# Altium footprint library Main_Power_Uint_Pcb_Library.PcbLib: 28 footprints (part 1 of 2)
Each footprint in its own frame and in the unit in brackets; x right, y up, seen from the top. Pads: shape width x height; smd on the part's side, far side on the other; paste and mask are expansions set on the pad; w line width, h text height; cw(c..) or ccw(c..) is an arc to the next point about the centre after c.
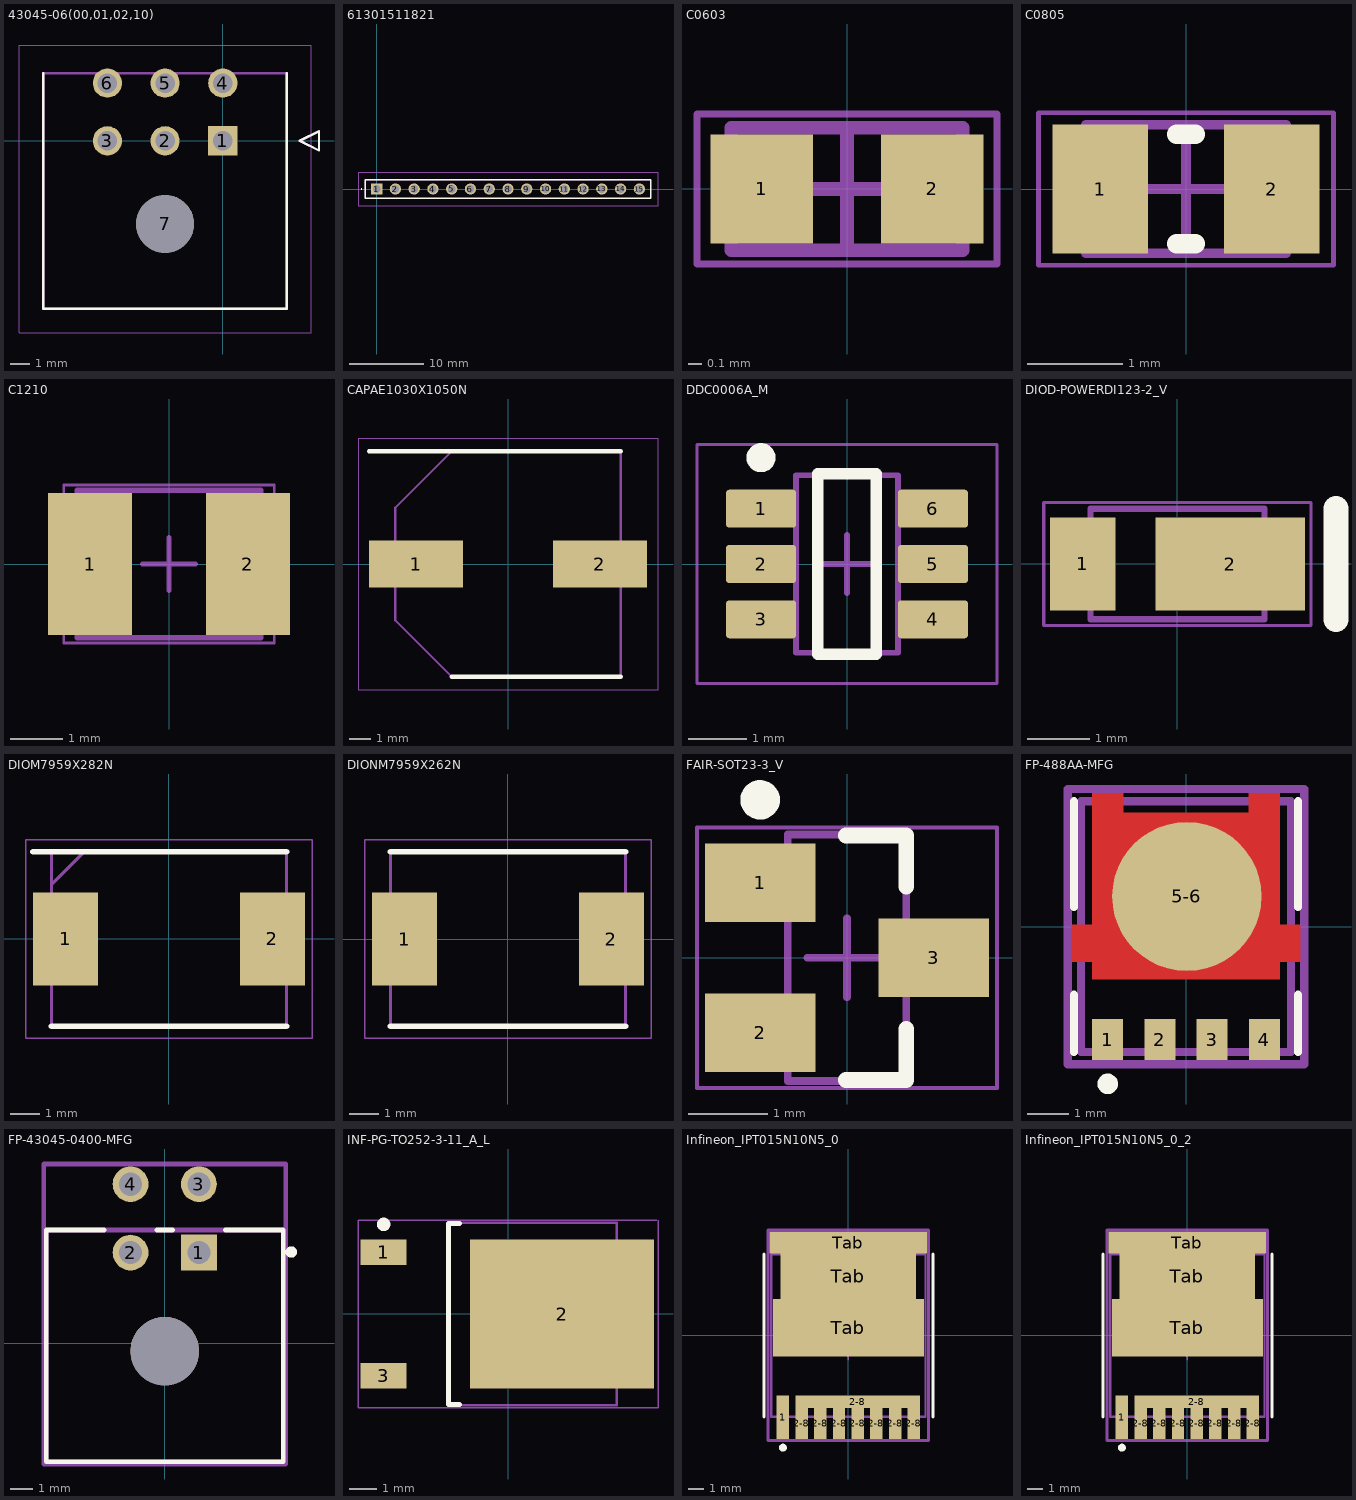
[diagram p0: the footprints below, top view; thin cyan lines are the x and y axes]

## 43045-06(00,01,02,10) [mm]
pads (7):
  rect 1.52x1.52 hole 1.02: 1(0,0)
  round 1.52 hole 1.02: 2(-3,0) 3(-6,0) 4(0,3) 5(-3,3) 6(-6,3)
  round 3 hole 3 unplated: 7(-3,-4.32)
Top Overlay:
  lines w0.127: -9.325,3.52 -9.325,-8.72 3.325,-8.72 3.325,3.52 ; 4,0 5,-0.5 5,0.5 4,0
Top 3D Body:
  lines w0.127: -9.325,-8.72 3.325,-8.72 3.325,3.52 -9.325,3.52 -9.325,-8.72 ; 4,0 5,-0.5 5,0.5 4,0
Top Courtyard:
  lines w0.05: -10.595,-9.99 4.595,-9.99 4.595,4.979 -10.595,4.979 -10.595,-9.99
3D body "43045-0600.stp": height 8.69, standoff -3.26, extent -9.585,-8.895 3.565,3.345

## 61301511821 [mm]
height 0.55
pads (15):
  rect 1.53x1.53 hole 1.02: 1(0,0)
  round 1.53 hole 1.02: 2(2.54,0) 3(5.08,0) 4(7.62,0) 5(10.16,0) 6(12.7,0) 7(15.24,0) 8(17.78,0) 9(20.32,0) 10(22.86,0) 11(25.4,0) 12(27.94,0) 13(30.48,0) 14(33.02,0) 15(35.56,0)
Top Overlay:
  lines w0.1: -2.1,0 cw(c-2.05,0) -2,0 cw(c-2.05,0) -2.1,0
  lines w0.2: -1.52,-1.25 -1.52,1.25 37.08,1.25 37.08,-1.25 -1.52,-1.25
Top 3D Body:
  lines w0.1: -1.52,-1.25 -1.52,1.25 37.08,1.25 37.08,-1.25 -1.52,-1.25
Top Courtyard:
  lines w0.1: -2.52,-2.25 -2.52,2.25 38.08,2.25 38.08,-2.25 -2.52,-2.25
3D body "61301511821.stp": height 8.75, standoff -5, extent -1.52,-1.25 37.08,1.25

## C0603 [mm]
height 0.55
pads (2):
  rect 0.75x0.8 smd: 1(-0.625,0) 2(0.625,0)
Top 3D Body:
  lines w0.1: -0.85,-0.45 -0.85,0.45 0.85,0.45 0.85,-0.45 -0.85,-0.45
Top Courtyard:
  lines w0.05: -1.1,-0.55 -1.1,0.55 1.1,0.55 1.1,-0.55 -1.1,-0.55
  lines w0.1: -0.45,0 0.45,0 ; 0,-0.45 0,0.45
3D body "Ceramic_Capacitor_0603_h32mil.step": height 0.81, standoff 0.01, extent -0.8,-0.4 0.8,0.4

## C0805 [mm]
height 0.65
pads (2):
  rect 1x1.35 smd: 1(-0.9,0) 2(0.9,0)
Top Overlay:
  lines w0.2: -0.1,-0.575 0.1,-0.575 ; -0.1,0.575 0.1,0.575
Top 3D Body:
  lines w0.1: -1.05,-0.675 1.05,-0.675 1.05,0.675 -1.05,0.675 -1.05,-0.675
Top Courtyard:
  lines w0.05: -1.55,-0.8 1.55,-0.8 1.55,0.8 -1.55,0.8 -1.55,-0.8
  lines w0.1: -0.5,0 0.5,0 ; 0,-0.5 0,0.5
3D body "Ceramic_Capacitor_0805_h32mil.step": height 0.81, standoff 0.01, extent -1,-0.625 1,0.625

## C1210 [mm]
height 2.8
pads (2):
  rect 1.6x2.7 smd: 1(-1.5,0) 2(1.5,0)
Top 3D Body:
  lines w0.1: -1.75,-1.4 -1.75,1.4 1.75,1.4 1.75,-1.4 -1.75,-1.4
Top Courtyard:
  lines w0.05: -2,-1.5 -2,1.5 2,1.5 2,-1.5 -2,-1.5
  lines w0.1: -0.5,0 0.5,0 ; 0,-0.5 0,0.5
3D body "Ceramic_Capacitor_1210_h38mil.step": height 0.96, standoff 0.01, extent -1.6,-1.25 1.6,1.25

## CAPAE1030X1050N [mm]
pads (2):
  rect 4.3x2.15 smd: 1(-4.2,0) 2(4.2,0)
Top Overlay:
  lines w0.2: -6.35,5.15 5.15,5.15 ; -2.575,-5.15 5.15,-5.15
Top 3D Body:
  lines w0.1: -5.15,-2.575 -2.575,-5.15 5.15,-5.15 5.15,5.15 -2.575,5.15 -5.15,2.575 -5.15,-2.575
Top Courtyard:
  lines w0.05: -6.85,-5.75 -6.85,5.75 6.85,5.75 6.85,-5.75 -6.85,-5.75
3D body "UCZ2A330MCL1GS.stp": height 10.5, standoff 0, extent -5.65,-5.25 5.65,5.25

## DDC0006A_M [mm] "SOT23, 6-Leads, Body 3.05x1.75mm, Pitch 0.95mm, IPC Low Density"
height 1.1
pads (6):
  rrect15% 1.2x0.65 smd: 1(-1.475,0.95) 2(-1.475,0) 3(-1.475,-0.95) 4(1.475,-0.95) 5(1.475,0) 6(1.475,0.95)
Top Overlay:
  circle w0.25: c-1.475,1.825 r0.125
  lines w0.2: -0.5,-1.55 -0.5,1.55 0.5,1.55 0.5,-1.55 -0.5,-1.55
Mechanical 1:
  text ".Designator" at -0.889,-0.127 h0.4
Top 3D Body:
  lines w0.1: -0.875,-1.525 0.875,-1.525 0.875,1.525 -0.875,1.525 -0.875,-1.525
Top Courtyard:
  lines w0.05: -2.575,-2.05 2.575,-2.05 2.575,2.05 -2.575,2.05 -2.575,-2.05
  lines w0.1: -0.5,0 0.5,0 ; 0,-0.5 0,0.5
3D body "DDC0006A.stp": height 0.9, standoff -0.02, extent -1.434,-1.485 1.434,1.485

## DIOD-POWERDI123-2_V [mm] "SOD, 2-Leads, Body 2.8x1.78mm"
height 1
pads (2):
  rect 1.05x1.5 smd: 1(-1.525,0)
  rect 2.4x1.5 smd: 2(0.85,0)
Top Overlay:
  lines w0.4: 2.55,-0.89 2.55,0.89
Top 3D Body:
  lines w0.1: -1.4,-0.89 1.4,-0.89 1.4,0.89 -1.4,0.89 -1.4,-0.89
Top Courtyard:
  lines w0.05: -2.15,-0.99 2.15,-0.99 2.15,0.99 -2.15,0.99 -2.15,-0.99
  lines w0.1: -0.25,0 0.25,0 ; 0,-0.25 0,0.25
3D body: height 1, standoff 0, extent -1.4,-0.89 1.4,0.89
3D body: height 1.01, standoff 1, extent 1.016,-0.89 1.27,0.89

## DIOM7959X282N [mm]
height 0.65
pads (2):
  rect 2.2x3.15 smd: 1(-3.5,0) 2(3.5,0)
Top Overlay:
  lines w0.2: -4.6,2.952 3.97,2.952 ; -3.97,-2.952 3.97,-2.952
Top 3D Body:
  lines w0.1: -3.97,1.852 -2.87,2.952 ; -3.97,-2.952 -3.97,2.952 3.97,2.952 3.97,-2.952 -3.97,-2.952
Top Courtyard:
  lines w0.05: -4.85,-3.36 -4.85,3.36 4.85,3.36 4.85,-3.36 -4.85,-3.36
3D body "SMLJ58AQ-TP.stp": height 2.5, standoff 0, extent -3.998,-3.05 4.002,3.05

## DIONM7959X262N [mm]
pads (2):
  rect 2.2x3.15 smd: 1(-3.5,0) 2(3.5,0)
Top Overlay:
  lines w0.2: -3.97,-2.952 3.97,-2.952 ; -3.97,2.952 3.97,2.952
Top 3D Body:
  lines w0.1: -3.97,-2.952 -3.97,2.952 3.97,2.952 3.97,-2.952 -3.97,-2.952
Top Courtyard:
  lines w0.05: -4.85,-3.36 -4.85,3.36 4.85,3.36 4.85,-3.36 -4.85,-3.36
3D body "SMDJ58A.stp": height 2.62, standoff 0, extent -3.97,-2.953 3.97,2.953

## FAIR-SOT23-3_V [mm] "SOT23, 3-Leads, Body 3.12x1.5mm, Pitch 0.95mm"
height 1.2
pads (3):
  rect 1.4x1 smd: 1(-1.1,0.95) 2(-1.1,-0.95) 3(1.1,0)
Top Overlay:
  circle w0.25: c-1.1,2 r0.125
  lines w0.2: -0.013,-1.55 0.75,-1.55 0.75,-0.9 ; -0.013,1.55 0.75,1.55 0.75,0.9
Top 3D Body:
  lines w0.1: -0.75,-1.56 -0.75,1.56 0.75,1.56 0.75,-1.56 -0.75,-1.56
Top Courtyard:
  lines w0.05: -1.9,-1.65 -1.9,1.65 1.9,1.65 1.9,-1.65 -1.9,-1.65
  lines w0.1: -0.5,0 0.5,0 ; 0,-0.5 0,0.5
3D body "SOT95P240X120-3L.step": height 1.2, standoff 0, extent -1.35,-1.56 1.35,1.56

## FP-488AA-MFG [mm]
height 0.65
pads (5):
  rect 0.75x1 smd paste+0 mask+0: 1(-1.905,-2.748) 2(-0.635,-2.748) 3(0.635,-2.748) 4(1.905,-2.748)
  round 3.631 smd paste+0 mask+0: 5-6(0.021,0.735)
Top Layer:
  region: -2.28,-1.282 -2.28,-0.857 -2.775,-0.857 -2.775,0.048 -2.28,0.047 -2.28,3.247 -1.53,3.247 -1.53,2.772 1.53,2.773 1.53,3.248 2.28,3.247 2.28,0.048 2.775,0.048 2.775,-0.857 2.28,-0.857 2.28,-1.283
Top Overlay:
  circle w0.25: c-1.905,-3.822 r0.125
  lines w0.2: -2.725,-3.05 -2.725,-1.657 ; -2.725,0.475 -2.725,3.05 ; 2.725,-3.05 2.725,-1.657 ; 2.725,0.475 2.725,3.05
Top Assembly:
  lines w0.2: -2.875,-3.347 2.875,-3.348 2.875,3.347 -2.875,3.347 -2.875,-3.347
Top 3D Body:
  lines w0.2: -2.55,-3.05 2.55,-3.05 2.55,3.05 -2.55,3.05 -2.55,-3.05
Top Courtyard:
  lines w0.2: -2.875,-3.347 2.875,-3.347 2.875,3.347 -2.875,3.347 -2.875,-3.347
Top Component Center:
  lines w0.1: -0.5,0 0.5,0 ; 0,-0.5 0,0.5
3D body "Trans_onsemi_NVMFS5A160PLZT1G_eec.STEP": height 0.25, standoff 0, extent -2.875,-3.347 2.875,3.347

## FP-43045-0400-MFG [mm]
height 7.5
pads (5):
  rect 1.57x1.57 hole 1.02 paste-2539.97 mask+0: 1(1.5,3.965)
  round 1.57 hole 1.02 paste-2539.97 mask+0: 2(-1.5,3.965) 3(1.5,6.965) 4(-1.5,6.965)
  round 3 hole 3 unplated paste-2539.97 mask+0: ""(0,-0.355)
Top Overlay:
  circle w0.25: c5.55,3.99 r0.125
  lines w0.2: -2.66,4.955 -5.2,4.955 -5.2,-5.205 5.2,-5.205 5.2,4.955 2.66,4.955 ; -0.34,4.955 0.34,4.955
Top Assembly:
  lines w0.2: -5.3,-5.305 5.3,-5.305 5.3,7.85 -5.3,7.85 -5.3,-5.305
Top 3D Body:
  lines w0.2: -5.2,-5.205 5.2,-5.205 5.2,4.955 -5.2,4.955 -5.2,-5.205
Top Courtyard:
  lines w0.2: -5.3,-5.305 5.3,-5.305 5.3,7.85 -5.3,7.85 -5.3,-5.305
Top Component Center:
  lines w0.1: -0.5,0 0.5,0 ; 0,-0.5 0,0.5
3D body "Conn_Molex_43045-0400_eec.STEP": height 0.25, standoff 0, extent -5.3,-5.305 5.3,7.85

## INF-PG-TO252-3-11_A_L [mm] "DPAK, 3-Leads, Body 6.57x6.1mm, Pitch 2.29mm, IPC High Density"
height 2.41
pads (3):
  rect 1.7x0.95 smd: 1(-4.6,2.29) 3(-4.6,-2.29)
  rect 6.8x5.5 smd: 2(2,0)
Top Overlay:
  circle w0.25: c-4.6,3.315 r0.125
  lines w0.2: -1.8,-3.35 -2.2,-3.35 -2.2,3.35 -1.8,3.35
Top 3D Body:
  lines w0.1: -2.2,-3.375 4.02,-3.375 4.02,3.375 -2.2,3.375 -2.2,-3.375
Top Courtyard:
  lines w0.05: -5.55,3.475 -5.55,-3.475 5.55,-3.475 5.55,3.475
  lines w0.055: -5.55,3.475 5.5,3.475
  lines w0.1: -0.5,0 0.5,0 ; 0,-0.5 0,0.5
3D body: height 2.41, standoff 0, extent -2.2,-3.375 4.02,3.375

## Infineon_IPT015N10N5_0 [mm]
height 7.5
pads (12):
  rect 0.8x2.8 smd paste-1000 mask+0: 1(-4.2,-5.25)
  rect 0.8x2 smd paste-1000 mask+0: 2-8(-3,-5.65) 2-8(-1.8,-5.65) 2-8(-0.6,-5.65) 2-8(0.6,-5.65) 2-8(1.8,-5.65) 2-8(3,-5.65) 2-8(4.2,-5.65)
  rect 8x0.8 smd paste-1000 mask+0: 2-8(0.6,-4.25)
  rect 9.7x3.7 smd paste-1000 mask+0: Tab(0,0.5)
  rect 10.1x1.4 smd paste-1000 mask+0: Tab(0,5.95)
  rect 8.7x2.9 smd paste-1000 mask+0: Tab(0,3.8)
Top Overlay:
  circle w0.25: c-4.2,-7.2 r0.125
  lines w0.2: -5.425,-5.215 -5.425,5.215 ; 5.425,-5.215 5.425,5.215
Top Paste:
  circle w0.5: c-4.2,-0.17 r0.25
  circle w0.5: c-3,-0.17 r0.25
  circle w0.5: c-1.8,-0.17 r0.25
  circle w0.5: c-0.6,-0.17 r0.25
  circle w0.5: c0.6,-0.17 r0.25
  circle w0.5: c1.8,-0.17 r0.25
  circle w0.5: c3,-0.17 r0.25
  circle w0.5: c4.2,-0.17 r0.25
  circle w0.5: c-4.2,1.03 r0.25
  circle w0.5: c-3,1.03 r0.25
  circle w0.5: c-1.8,1.03 r0.25
  circle w0.5: c-0.6,1.03 r0.25
  circle w0.5: c0.6,1.03 r0.25
  circle w0.5: c1.8,1.03 r0.25
  circle w0.5: c3,1.03 r0.25
  circle w0.5: c4.2,1.03 r0.25
  circle w0.5: c-3,2.23 r0.25
  circle w0.5: c-1.8,2.23 r0.25
  circle w0.5: c-0.6,2.23 r0.25
  circle w0.5: c0.6,2.23 r0.25
  circle w0.5: c1.8,2.23 r0.25
  circle w0.5: c3,2.23 r0.25
  circle w0.5: c-3,3.43 r0.25
  circle w0.5: c1.8,3.43 r0.25
  circle w0.5: c-1.8,3.43 r0.25
  circle w0.5: c-0.6,3.43 r0.25
  circle w0.5: c0.6,3.43 r0.25
  circle w0.5: c3,3.43 r0.25
  circle w0.5: c-3,4.63 r0.25
  circle w0.5: c-1.8,4.63 r0.25
  circle w0.5: c-0.6,4.63 r0.25
  circle w0.5: c0.6,4.63 r0.25
  circle w0.5: c1.8,4.63 r0.25
  circle w0.5: c3,4.63 r0.25
  circle w0.5: c-4.2,5.83 r0.25
  circle w0.5: c-3,5.83 r0.25
  circle w0.5: c-1.8,5.83 r0.25
  circle w0.5: c-0.6,5.83 r0.25
  circle w0.5: c0.6,5.83 r0.25
  circle w0.5: c1.8,5.83 r0.25
  circle w0.5: c3,5.83 r0.25
  circle w0.5: c4.2,5.83 r0.25
  rectangle: -4.55,-6.55 -3.85,-3.95
  rectangle: -3.35,-6.55 -2.65,-3.95
  rectangle: -2.15,-6.55 -1.45,-3.95
  rectangle: -0.95,-6.55 -0.25,-3.95
  rectangle: 0.25,-6.55 0.95,-3.95
  rectangle: 1.45,-6.55 2.15,-3.95
  rectangle: 2.65,-6.55 3.35,-3.95
  rectangle: 3.85,-6.55 4.55,-3.95
Mechanical 10:
  lines w0.2: -5.15,-6.75 5.15,-6.75 5.15,6.75 -5.15,6.75 -5.15,-6.75
  text ".Designator" at 0,0 h0.75
Mechanical 12:
  lines w0.15: -4.95,-5.215 4.95,-5.215 4.95,5.215 -4.95,5.215 -4.95,-5.215
Top Courtyard:
  lines w0.1: -1.545,0 1.545,0 ; 0,-1.545 0,1.545
  lines w0.2: -5.15,-6.75 5.15,-6.75 5.15,6.75 -5.15,6.75 -5.15,-6.75
3D body "3dmodel.step": height 2.3, standoff 0, extent -4.95,-5.332 4.95,6.343

## Infineon_IPT015N10N5_0_2 [mm]
pads (12):
  rect 0.8x2.8 smd paste-1000 mask+0: 1(-4.2,-5.25)
  rect 0.8x2 smd paste-1000 mask+0: 2-8(-3,-5.65) 2-8(-1.8,-5.65) 2-8(-0.6,-5.65) 2-8(0.6,-5.65) 2-8(1.8,-5.65) 2-8(3,-5.65) 2-8(4.2,-5.65)
  rect 8x0.8 smd paste-1000 mask+0: 2-8(0.6,-4.25)
  rect 8.7x2.9 smd paste-1000 mask+0: Tab(0,3.8)
  rect 9.7x3.7 smd paste-1000 mask+0: Tab(0,0.5)
  rect 10.1x1.4 smd paste-1000 mask+0: Tab(0,5.95)
Top Overlay:
  circle w0.25: c-4.2,-7.2 r0.125
  lines w0.2: -5.425,-5.215 -5.425,5.215 ; 5.425,-5.215 5.425,5.215
Top Paste:
  circle w0.5: c-4.2,-0.17 r0.25
  circle w0.5: c-3,-0.17 r0.25
  circle w0.5: c-1.8,-0.17 r0.25
  circle w0.5: c-0.6,-0.17 r0.25
  circle w0.5: c0.6,-0.17 r0.25
  circle w0.5: c1.8,-0.17 r0.25
  circle w0.5: c3,-0.17 r0.25
  circle w0.5: c4.2,-0.17 r0.25
  circle w0.5: c-4.2,1.03 r0.25
  circle w0.5: c-3,1.03 r0.25
  circle w0.5: c-1.8,1.03 r0.25
  circle w0.5: c-0.6,1.03 r0.25
  circle w0.5: c0.6,1.03 r0.25
  circle w0.5: c1.8,1.03 r0.25
  circle w0.5: c3,1.03 r0.25
  circle w0.5: c4.2,1.03 r0.25
  circle w0.5: c-3,2.23 r0.25
  circle w0.5: c-1.8,2.23 r0.25
  circle w0.5: c-0.6,2.23 r0.25
  circle w0.5: c0.6,2.23 r0.25
  circle w0.5: c1.8,2.23 r0.25
  circle w0.5: c3,2.23 r0.25
  circle w0.5: c-3,3.43 r0.25
  circle w0.5: c1.8,3.43 r0.25
  circle w0.5: c-1.8,3.43 r0.25
  circle w0.5: c-0.6,3.43 r0.25
  circle w0.5: c0.6,3.43 r0.25
  circle w0.5: c3,3.43 r0.25
  circle w0.5: c-3,4.63 r0.25
  circle w0.5: c-1.8,4.63 r0.25
  circle w0.5: c-0.6,4.63 r0.25
  circle w0.5: c0.6,4.63 r0.25
  circle w0.5: c1.8,4.63 r0.25
  circle w0.5: c3,4.63 r0.25
  circle w0.5: c-4.2,5.83 r0.25
  circle w0.5: c-3,5.83 r0.25
  circle w0.5: c-1.8,5.83 r0.25
  circle w0.5: c-0.6,5.83 r0.25
  circle w0.5: c0.6,5.83 r0.25
  circle w0.5: c1.8,5.83 r0.25
  circle w0.5: c3,5.83 r0.25
  circle w0.5: c4.2,5.83 r0.25
  rectangle: -4.55,-6.55 -3.85,-3.95
  rectangle: -3.35,-6.55 -2.65,-3.95
  rectangle: -2.15,-6.55 -1.45,-3.95
  rectangle: -0.95,-6.55 -0.25,-3.95
  rectangle: 0.25,-6.55 0.95,-3.95
  rectangle: 1.45,-6.55 2.15,-3.95
  rectangle: 2.65,-6.55 3.35,-3.95
  rectangle: 3.85,-6.55 4.55,-3.95
Mechanical 10:
  lines w0.2: -5.15,-6.75 5.15,-6.75 5.15,6.75 -5.15,6.75 -5.15,-6.75
  text ".Designator" at 0,0 h0.75
Mechanical 12:
  lines w0.15: -4.95,-5.215 4.95,-5.215 4.95,5.215 -4.95,5.215 -4.95,-5.215
Top Courtyard:
  lines w0.1: -1.545,0 1.545,0 ; 0,-1.545 0,1.545
  lines w0.2: -5.15,-6.75 5.15,-6.75 5.15,6.75 -5.15,6.75 -5.15,-6.75
3D body "3dmodel.step": height 2.3, standoff 0, extent -4.95,-5.332 4.95,6.343